# Altium footprint library PcbLibrary_power.PcbLib: 31 footprints (part 1 of 2)
Each footprint in its own frame and in the unit in brackets; x right, y up, seen from the top. Pads: shape width x height; smd on the part's side, far side on the other; paste and mask are expansions set on the pad; w line width, h text height; cw(c..) or ccw(c..) is an arc to the next point about the centre after c.
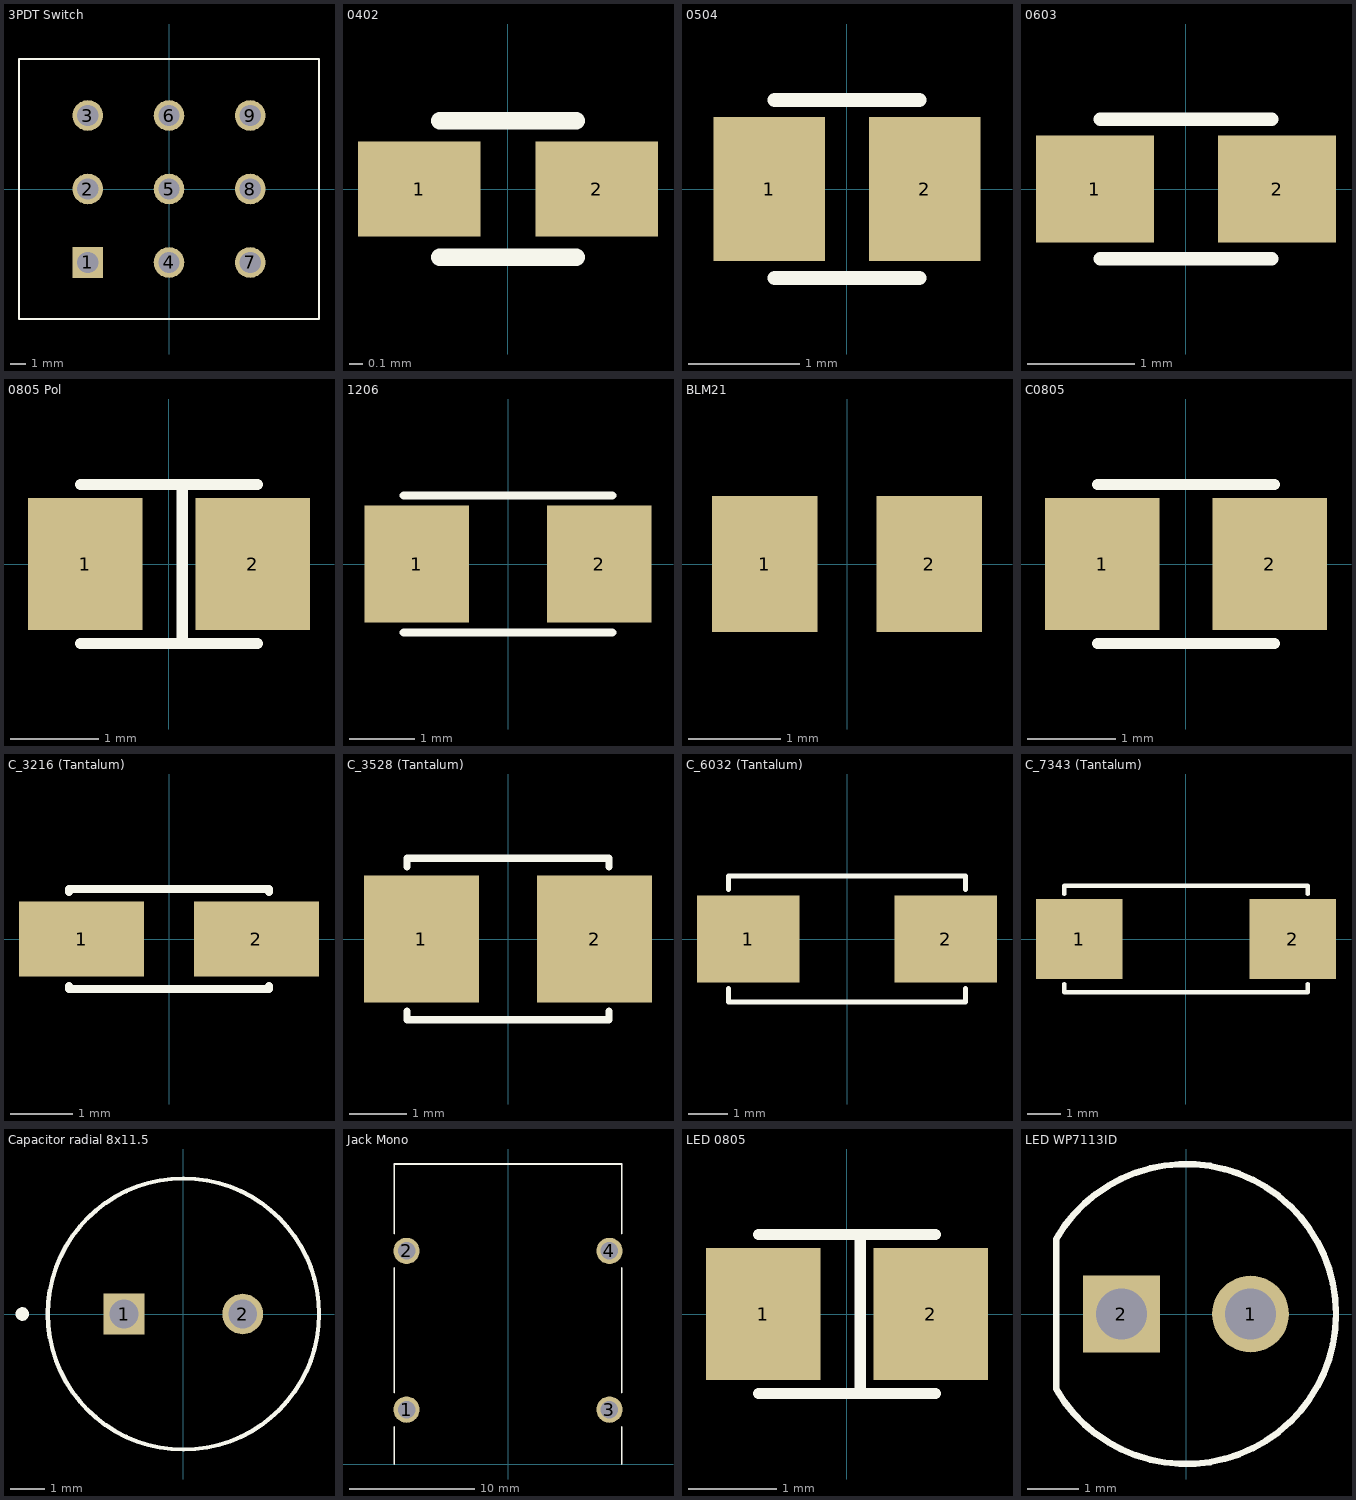
[diagram p0: the footprints below, top view; thin cyan lines are the x and y axes]

## 3PDT Switch [mm] "3PDT Switch"
height 38.2
pads (9):
  rect 2x2 / inner round 2 / far side rect 2x2 hole 1.4: 1(-5.3,-4.8)
  round 2 hole 1.4: 2(-5.3,0) 3(-5.3,4.8) 4(0,-4.8) 5(0,0) 6(0,4.8) 7(5.3,-4.8) 8(5.3,0) 9(5.3,4.8)
Top Overlay:
  lines w0.127: -9.8,-8.5 -9.8,8.5 9.8,8.5 9.8,-8.5 -9.8,-8.5
3D body "step_temp.STEP": height 38.2, standoff -3, extent -9.8,-8.5 9.8,8.5

## 0402 [mm] "0402 (1005 mm)"
pads (2):
  rect 0.9x0.7 smd: 1(-0.65,0) 2(0.65,0)
Top Overlay:
  lines w0.127: -0.5,-0.5 0.5,-0.5 ; -0.5,0.5 0.5,0.5

## 0504 [mm] "0504 (1310 mm)"
pads (2):
  rect 1x1.3 smd: 1(-0.7,0) 2(0.7,0)
Top Overlay:
  lines w0.127: -0.65,-0.8 0.65,-0.8 ; -0.65,0.8 0.65,0.8

## 0603 [mm] "0603 (1608 mm)"
pads (2):
  rect 1.1x1 smd: 1(-0.85,0) 2(0.85,0)
Top Overlay:
  lines w0.127: -0.8,-0.65 0.8,-0.65 ; -0.8,0.65 0.8,0.65

## 0805 Pol [mm] "Polarized 0805 (2012 mm)"
pads (2):
  rect 1.3x1.5 smd: 1(-0.95,0) 2(0.95,0)
Top Overlay:
  lines w0.127: -1,-0.9 1,-0.9 ; -1,0.9 1,0.9 ; 0.15,-0.9 0.15,0.9

## 1206 [mm] "1206 (3216 mm)"
pads (2):
  rect 1.6x1.8 smd: 1(-1.4,0) 2(1.4,0)
Top Overlay:
  lines w0.127: -1.6,-1.05 1.6,-1.05 ; -1.6,1.05 1.6,1.05

## BLM21 [mm] "Ferrite bead BLM21"
pads (2):
  rect 1.14x1.47 smd: 1(-0.89,0) 2(0.89,0)
3D body "BLM21BB151SZ1D.STEP": height 1.05, standoff 0, extent -1,-0.625 1,0.625

## C0805 [mm] "Capacitor 0805 (2012 mm)"
pads (2):
  rect 1.3x1.5 smd: 1(-0.95,0) 2(0.95,0)
Top Overlay:
  lines w0.127: -1,-0.9 1,-0.9 ; -1,0.9 1,0.9
3D body "C2012NP02A103J125AA.STEP": height 1.45, standoff 0, extent -1,-0.625 1,0.625

## C_3216 (Tantalum) [mm] "Tantalum capacitor 3216"
pads (2):
  rect 2x1.2 smd: 1(-1.4,0) 2(1.4,0)
Top Overlay:
  lines w0.127: -1.6,-0.75 -1.6,-0.8 1.6,-0.8 1.6,-0.75 ; -1.6,0.75 -1.6,0.8 1.6,0.8 1.6,0.75

## C_3528 (Tantalum) [mm] "Tantalum capacitor 3528"
pads (2):
  rect 2x2.2 smd: 1(-1.5,0) 2(1.5,0)
Top Overlay:
  lines w0.127: -1.75,-1.25 -1.75,-1.4 1.75,-1.4 1.75,-1.25 ; -1.75,1.25 -1.75,1.4 1.75,1.4 1.75,1.25

## C_6032 (Tantalum) [mm] "Tantalum capacitor 6032"
pads (2):
  rect 2.6x2.2 smd: 1(-2.5,0) 2(2.5,0)
Top Overlay:
  lines w0.127: -3,-1.25 -3,-1.6 3,-1.6 3,-1.25 ; -3,1.25 -3,1.6 3,1.6 3,1.25

## C_7343 (Tantalum) [mm] "Tantalum capacitor 7343"
pads (2):
  rect 2.6x2.4 smd: 1(-3.2,0) 2(3.2,0)
Top Overlay:
  lines w0.127: -3.65,-1.35 -3.65,-1.6 3.65,-1.6 3.65,-1.35 ; -3.65,1.35 -3.65,1.6 3.65,1.6 3.65,1.35

## Capacitor radial 8x11.5 [mm]
pads (2):
  rect 1.2x1.2 hole 0.85: 1(-1.75,0)
  round 1.2 hole 0.85: 2(1.75,0)
Top Overlay:
  circle w0.127: c0,0 r4
  circle w0.2: c-4.75,0 r0.1
3D body "step_temp.STEP": height 11.5, standoff -17, extent -4,-4 4,4

## Jack Mono [mm] "Jack Mono"
height 15.84
pads (4):
  round 2.1 hole 1.4: 1(-8.115,4.35) 2(-8.115,17.05) 3(8.115,4.35) 4(8.115,17.05)
Top Overlay:
  lines w0.127: -9.1,0 -9.1,2.98 ; -9.1,5.72 -9.1,15.68 ; -9.1,18.42 -9.1,24 9.1,24 9.1,18.42 ; 9.1,0 9.1,2.98 ; 9.1,5.72 9.1,15.68
Mechanical 13:
  lines w0.127: -9.1,24 9.1,24
3D body "step_temp.STEP": height 17.01, standoff -4, extent -9.1,-8.825 9.1,24.025

## LED 0805 [mm] "LED 0805 (2012 mm)"
pads (2):
  rect 1.3x1.5 smd: 1(-0.95,0) 2(0.95,0)
Top Overlay:
  lines w0.127: -1,-0.9 1,-0.9 ; -1,0.9 1,0.9 ; 0.15,-0.9 0.15,0.9
3D body "LED.STEP": height 0.7, standoff 0, extent -1,-0.625 1,0.625

## LED WP7113ID [mm] "LED WP7113ID"
pads (2):
  round 1.508 hole 1: 1(1.27,0)
  rect 1.508x1.508 / inner round 1.508 / far side rect 1.508x1.508 hole 1: 2(-1.27,0)
Top Overlay:
  lines w0.127: -2.555,-1.475 ccw(c0,0) -2.555,1.475 ; -2.555,-1.473 -2.555,1.473
3D body "step_temp.STEP": height 9.6, standoff -26, extent -2.5,-2.95 2.95,2.95